# EAGLE library part IC_ADS1115 (library dp_devices.v6)
ADS1115 Ultra Small, Low-power I2C 860-SPS 16-bit ADC with internal reference, oscillator and programmable comparator
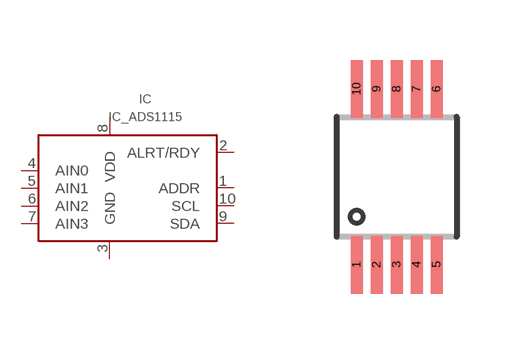
[diagram p186: symbol with the pads of VSSOP-10; footprint VSSOP-10]

Designator prefix IC

## IC_ADS1115  [VSSOP-10]
1  ADDR  in
2  ALRT/RDY  out
3  GND  sup
4  AIN0  in
5  AIN1  in
6  AIN2  in
7  AIN3  in
8  VDD  sup
9  SDA
10  SCL  in

## Footprint VSSOP-10 (pad centres in mm)
Very Small plastic small outline pin pitch 0.5mm
smd 0.3 x 1.45: 1 -1,-2.2; 2 -0.5,-2.2; 3 0,-2.2; 4 0.5,-2.2; 5 1,-2.2; 6 1,2.2; 7 0.5,2.2; 8 0,2.2; 9 -0.5,2.2; 10 -1,2.2